# Altium integrated library WE-PD_1210.IntLib: 1 symbol
Pins are listed as number, name and electrical type; pins without a type are passive.

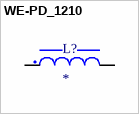
[diagram p0: symbol WE-PD_1210]

## WE-PD_1210
designator L?
Size 1210; L = 150 ÂµH Â±20%; IR = 2.1 A; Isat = 2.7 A; RDC = 200 mâ„¦; MF: Wurth Electronics; MP: 7447709151; SnapEDA_Link: https://www.snapeda.com/parts/7447709151/Wurth+Electronics/view-part/?ref=snap; Package: Nonstandard WÃ¼rth Elektronik; Value: *; Check_prices: https://www.snapeda.com/parts/7447709151/Wurth+Electronics/view-part/?ref=eda
footprint WE-PD_1210
pins: 1, 2